# EAGLE library part MAX6070 (library AudioMoth 1.1.0)
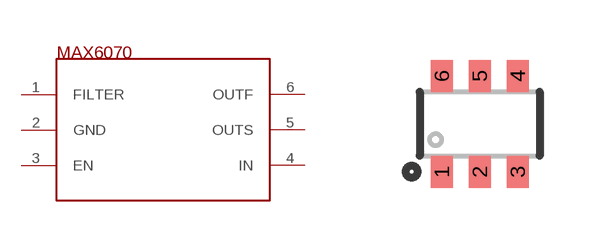
[diagram p4: symbol with the pads of SOT26$1; footprint SOT26$1]

Designator prefix U

## MAX6070SOT23  [SOT26$1]
1  FILTER
2  GND
3  EN
4  IN
5  OUTS
6  OUTF

## Footprint SOT26$1 (pad centres in mm)
Footprint for SOT-26 part DMP2240UDM
smd 0.55 x 0.8: 1 -0.95,-1.2; 2 0,-1.2; 3 0.95,-1.2; 4 0.95,1.2; 5 0,1.2; 6 -0.95,1.2